# Altium integrated library Altium_Relay.IntLib: 31 symbols
Pins are listed as number, name and electrical type; pins without a type are passive.

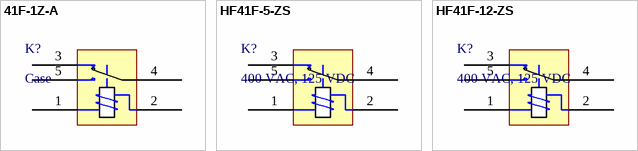
[diagram p0: symbols 41F-1Z-A to HF41F-12-ZS]

## 41F-1Z-A
designator K?, comment Case
H41F Relay Socket; Manufacturer: OEM; Manufacturer Part Number: 41F-1Z-A; Associated Relay Series: H41F; Coil Current: N/A; Coil Resistance: N/A; Coil Voltage: N/A; ComponentLink1Description: Datasheet; ComponentLink1URL: N/A; Contact Current Rating: N/A; Power Consumption: N/A; Supplier 1 URL: N/A; Supplier 2 URL: N/A; Supplier 3 URL: https://www.thegioiic.com/41f-1z-a-de-relay-hf41f-5-chan; Switching Voltage Max: N/A; Value: Case; Mount: THT; Supplier 1: Mouser; Supplier 1 Part Number: N/A; Supplier 2: Digi-Key; Supplier 2 Part Number: N/A; Supplier 3: thegioiic; Supplier 3 Part Number: N/A
footprint HF41F Relay Socket
pins: 1 Coil "-", 2 Coil "+", 3 NC, 4 Out, 5 NO

## HF41F-5-ZS
designator K?, comment 400 VAC, 125 VDC
Coil Voltage: 5 VDC; Contact Current Rating: 6A; Switching Voltage Max:  400 VAC, 125 VDC; Manufacturer: Hongfa; Manufacturer Part Number: HF41F-5-ZS; Coil Voltage: 5 VDC; Switching Voltage Max: 400 VAC, 125 VDC; Associated Relay Series: N/A; Coil Current: N/A; Coil Resistance: N/A; ComponentLink1Description: Datasheet; ComponentLink1URL: https://source.hongfa.com//pdf/web/viewer.html?file=\Uploads\Product\PDF\HF41F_en.pdf?timestamp=1691114729; Power Consumption: N/A; Supplier 1 URL: N/A; Supplier 2 URL: N/A; Supplier 3 URL: https://www.thegioiic.com/hf41f-5-zs-ro-le-5vdc-6a-spdt-5-chan; Value: 400 VAC, 125 VDC; Mount: THT; Supplier 1: Mouser; Supplier 1 Part Number: N/A; Supplier 2: Digi-Key; Supplier 2 Part Number: N/A; Supplier 3: thegioiic; Supplier 3 Part Number: N/A
footprint HF41F
pins: 1 Coil "-", 2 Coil "+", 3 NC, 4 Out, 5 NO

## HF41F-12-ZS
designator K?, comment 400 VAC, 125 VDC
Coil Voltage: 12 VDC; Contact Current Rating: 6A; Switching Voltage Max:  400 VAC, 125 VDC; Manufacturer: Hongfa; Manufacturer Part Number: HF41F-12-ZS; Coil Voltage: 12 VDC; Switching Voltage Max: 400 VAC, 125 VDC; Associated Relay Series: N/A; Coil Current: N/A; Coil Resistance: N/A; ComponentLink1Description: Datasheet; ComponentLink1URL: https://source.hongfa.com//pdf/web/viewer.html?file=\Uploads\Product\PDF\HF41F_en.pdf?timestamp=1691114729; Power Consumption: N/A; Supplier 1 URL: N/A; Supplier 2 URL: N/A; Supplier 3 URL: https://www.thegioiic.com/hf41f-12-zs-ro-le-12vdc-6a-spdt-5-chan; Value: 400 VAC, 125 VDC; Mount: THT; Supplier 1: Mouser; Supplier 1 Part Number: N/A; Supplier 2: Digi-Key; Supplier 2 Part Number: N/A; Supplier 3: thegioiic; Supplier 3 Part Number: N/A
footprint HF41F
pins: 1 Coil "-", 2 Coil "+", 3 NC, 4 Out, 5 NO


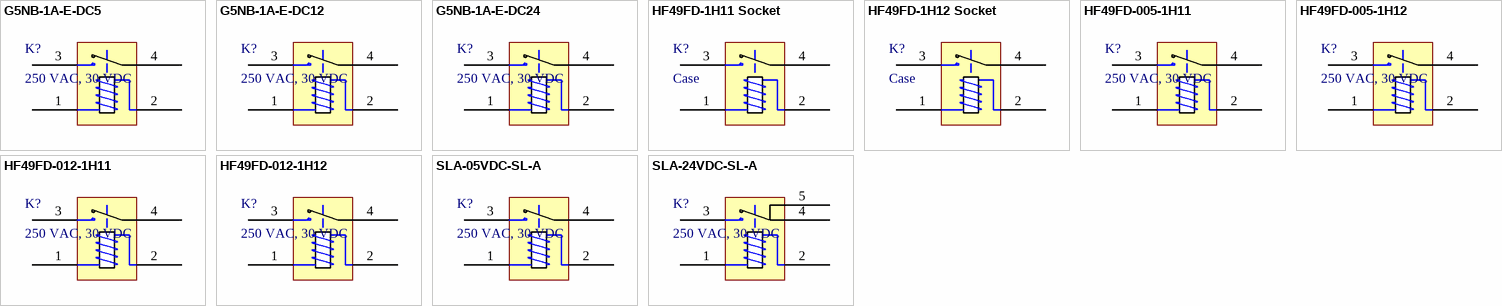
[diagram p1: symbols G5NB-1A-E-DC5 to SLA-24VDC-SL-A]

## G5NB-1A-E-DC5
designator K?, comment 250 VAC, 30 VDC
General Purpose Relays SPST-NO Flux-Tight 5VDC High-Capacity; Manufacturer: Hongfa; Manufacturer Part Number: HF46F-G 5-HS1; Contact Current Rating: 5 A; Coil Current: 40 mA; Coil Resistance: 125 Ohms; Power Consumption: 200 mW; Coil Voltage: 5 VDC; Switching Voltage Max: 250 VAC, 30 VDC; Associated Relay Series: N/A; ComponentLink1Description: Datasheet; ComponentLink1URL: https://www.mouser.vn/datasheet/2/307/en_g5nb-1112517.pdf; Supplier 1 URL: https://www.mouser.vn/ProductDetail/Omron-Electronics/G5NB-1A-E-DC24?qs=3jhwTwe4bOHjt65REhrORA%3D%3D; Supplier 2 URL: N/A; Supplier 3 URL: https://www.thegioiic.com/hf46f-g-5-hs1-ro-le-5vdc-7a-spst-no-4-chan; Value: 250 VAC, 30 VDC; Mount: THT; Package / Case: SPST; Packaging: Tape and Reel; Supplier 1: Mouser; Supplier 1 Part Number: 653-G5NB-1A-E-DC5; Supplier 2: Digi-Key; Supplier 2 Part Number: N/A; Supplier 3: thegioiic; Supplier 3 Part Number: N/A
footprint HF46F
pins: 1 Coil "-", 2 Coil "+", 3 NO, 4

## G5NB-1A-E-DC12
designator K?, comment 250 VAC, 30 VDC
General Purpose Relays SPST-NO Flux-Tight 12VDC High-Capacity; Manufacturer: Hongfa; Manufacturer Part Number: HF46F-G 12-HS1; Contact Current Rating: 5 A; Coil Current: 16.7 mA; Coil Resistance: 720 Ohms; Power Consumption: 200 mW; Coil Voltage: 12 VDC; Switching Voltage Max: 250 VAC, 30 VDC; Associated Relay Series: N/A; ComponentLink1Description: Datasheet; ComponentLink1URL: https://www.mouser.vn/datasheet/2/307/en_g5nb-1112517.pdf; Supplier 1 URL: https://www.mouser.vn/ProductDetail/Omron-Electronics/G5NB-1A-E-DC24?qs=3jhwTwe4bOHjt65REhrORA%3D%3D; Supplier 2 URL: N/A; Supplier 3 URL: https://www.thegioiic.com/hf46f-g-12-hs1-ro-le-12vdc-7a-spst-no-4-chan; Value: 250 VAC, 30 VDC; Mount: THT; Package / Case: SPST; Packaging: Tape and Reel; Supplier 1: Mouser; Supplier 1 Part Number: 653-G5NB-1A-E-DC12; Supplier 2: Digi-Key; Supplier 2 Part Number: N/A; Supplier 3: thegioiic; Supplier 3 Part Number: N/A
footprint HF46F
pins: 1 Coil "-", 2 Coil "+", 3 NO, 4

## G5NB-1A-E-DC24
designator K?, comment 250 VAC, 30 VDC
General Purpose Relays SPST-NO Flux-Tight 24VDC High-Capacity; Manufacturer: Hongfa; Manufacturer Part Number: G5NB-1A-E-24VDC; Contact Current Rating: 5 A; Coil Current: 8.3 mA; Coil Resistance: 2.88 kOhms; Power Consumption: 200 mW; Coil Voltage: 24 VDC; Switching Voltage Max: 250 VAC, 30 VDC; Associated Relay Series: N/A; ComponentLink1Description: Datasheet; ComponentLink1URL: https://www.mouser.vn/datasheet/2/307/en_g5nb-1112517.pdf; Supplier 1 URL: https://www.mouser.vn/ProductDetail/Omron-Electronics/G5NB-1A-E-DC24?qs=3jhwTwe4bOHjt65REhrORA%3D%3D; Supplier 2 URL: N/A; Supplier 3 URL: https://www.thegioiic.com/g5nb-1a-e-24vdc-ro-le-24vdc-5a-spst-no-4-chan; Value: 250 VAC, 30 VDC; Mount: THT; Package / Case: SPST; Packaging: Tape and Reel; Supplier 1: Mouser; Supplier 1 Part Number: 653-G5NB-1A-E-DC24; Supplier 2: Digi-Key; Supplier 2 Part Number: N/A; Supplier 3: thegioiic; Supplier 3 Part Number: N/A
footprint HF46F
pins: 1 Coil "-", 2 Coil "+", 3 NO, 4

## HF49FD-1H11 Socket
designator K?, comment Case
Associated Relay Series: HF49FD-1H11; Manufacturer: OEM; Coil Current: N/A; Coil Resistance: N/A; Coil Voltage: N/A; ComponentLink1Description: Datasheet; ComponentLink1URL: N/A; Contact Current Rating: N/A; Power Consumption: N/A; Supplier 1 URL: N/A; Supplier 2 URL: N/A; Supplier 3 URL: https://www.thegioiic.com/de-relay-hf49fd-1h11-4-chan; Switching Voltage Max: N/A; Value: Case; Manufacturer Part Number: HF49FD-1H11; Mount: THT; Package / Case: SPST; Packaging: Tape and Reel; Supplier 1: Mouser; Supplier 1 Part Number: N/A; Supplier 2: Digi-Key; Supplier 2 Part Number: N/A; Supplier 3: thegioiic; Supplier 3 Part Number: N/A
footprint HF49FD-1H11 Relay Scoket
pins: 1 Coil "-", 2 Coil "+", 3 NO, 4

## HF49FD-1H12 Socket
designator K?, comment Case
Associated Relay Series: HF49FD-1H12; Manufacturer: OEM; Coil Current: N/A; Coil Resistance: N/A; Coil Voltage: N/A; ComponentLink1Description: Datasheet; ComponentLink1URL: N/A; Contact Current Rating: N/A; Power Consumption: N/A; Supplier 1 URL: N/A; Supplier 2 URL: N/A; Supplier 3 URL: https://www.thegioiic.com/de-relay-hf49fd-1h12-4-chan; Switching Voltage Max: N/A; Value: Case; Manufacturer Part Number: HF49FD-1H12; Mount: THT; Package / Case: SPST; Packaging: Tape and Reel; Supplier 1: Mouser; Supplier 1 Part Number: N/A; Supplier 2: Digi-Key; Supplier 2 Part Number: N/A; Supplier 3: thegioiic; Supplier 3 Part Number: N/A
footprint HF49FD-1H12 Relay Scoket
pins: 1 Coil "-", 2 Coil "+", 3 NO, 4

## HF49FD-005-1H11
designator K?, comment 250 VAC, 30 VDC
Coil Voltage: 5 VDC; Contact Current Rating: 5A; Switching Voltage Max: 250 VAC, 30 VDC; Manufacturer: Hongfa; Manufacturer Part Number: HF49FD-005-1H11; Coil Voltage: 5 VDC; Associated Relay Series: N/A; Coil Current: N/A; Coil Resistance: N/A; ComponentLink1Description: Datasheet; ComponentLink1URL: https://source.hongfa.com//pdf/web/viewer.html?file=/Uploads/Product/PDF/HF49FD_en.pdf; Power Consumption: N/A; Supplier 1 URL: N/A; Supplier 2 URL: N/A; Supplier 3 URL: https://www.thegioiic.com/hf49fd-005-1h11-ro-le-5vdc-5a-spst-no-4-chan; Value: 250 VAC, 30 VDC; Mount: THT; Package / Case: SPST; Packaging: Tape and Reel; Supplier 1: Mouser; Supplier 1 Part Number: N/A; Supplier 2: Digi-Key; Supplier 2 Part Number: N/A; Supplier 3: thegioiic; Supplier 3 Part Number: N/A
footprint HF49FD-1H11
pins: 1 Coil "-", 2 Coil "+", 3 NO, 4

## HF49FD-005-1H12
designator K?, comment 250 VAC, 30 VDC
Coil Voltage: 5 VDC; Contact Current Rating: 5A; Switching Voltage Max: 250 VAC, 30 VDC; Manufacturer: Hongfa; Manufacturer Part Number: HF49FD-005-1H12; Coil Voltage: 5 VDC; Associated Relay Series: N/A; Coil Current: N/A; Coil Resistance: N/A; ComponentLink1Description: Datasheet; ComponentLink1URL: https://source.hongfa.com//pdf/web/viewer.html?file=/Uploads/Product/PDF/HF49FD_en.pdf; Power Consumption: N/A; Supplier 1 URL: N/A; Supplier 2 URL: N/A; Supplier 3 URL: https://www.thegioiic.com/hf49fd-005-1h12-ro-le-5vdc-5a-spst-no-4-chan; Value: 250 VAC, 30 VDC; Mount: THT; Package / Case: SPST; Packaging: Tape and Reel; Supplier 1: Mouser; Supplier 1 Part Number: N/A; Supplier 2: Digi-Key; Supplier 2 Part Number: N/A; Supplier 3: thegioiic; Supplier 3 Part Number: N/A
footprint HF49FD-1H12
pins: 1 Coil "-", 2 Coil "+", 3 NO, 4

## HF49FD-012-1H11
designator K?, comment 250 VAC, 30 VDC
Coil Voltage: 12 VDC; Contact Current Rating: 5A; Switching Voltage Max: 250 VAC, 30 VDC; Manufacturer: Hongfa; Manufacturer Part Number: HF49FD-012-1H11; Coil Voltage: 12 VDC; Associated Relay Series: N/A; Coil Current: N/A; Coil Resistance: N/A; ComponentLink1Description: Datasheet; ComponentLink1URL: https://source.hongfa.com//pdf/web/viewer.html?file=/Uploads/Product/PDF/HF49FD_en.pdf; Power Consumption: N/A; Supplier 1 URL: N/A; Supplier 2 URL: N/A; Supplier 3 URL: https://www.thegioiic.com/hf49fd-012-1h11-ro-le-12vdc-5a-spst-no-4-chan; Value: 250 VAC, 30 VDC; Mount: THT; Package / Case: SPST; Packaging: Tape and Reel; Supplier 1: Mouser; Supplier 1 Part Number: N/A; Supplier 2: Digi-Key; Supplier 2 Part Number: N/A; Supplier 3: thegioiic; Supplier 3 Part Number: N/A
footprint HF49FD-1H11
pins: 1 Coil "-", 2 Coil "+", 3 NO, 4

## HF49FD-012-1H12
designator K?, comment 250 VAC, 30 VDC
Coil Voltage: 12 VDC; Contact Current Rating: 5A; Switching Voltage Max: 250 VAC, 30 VDC; Manufacturer: Hongfa; Manufacturer Part Number: HF49FD-012-1H12; Coil Voltage: 12 VDC; Associated Relay Series: N/A; Coil Current: N/A; Coil Resistance: N/A; ComponentLink1Description: Datasheet; ComponentLink1URL: https://source.hongfa.com//pdf/web/viewer.html?file=/Uploads/Product/PDF/HF49FD_en.pdf; Power Consumption: N/A; Supplier 1 URL: N/A; Supplier 2 URL: N/A; Supplier 3 URL: https://www.thegioiic.com/hf49fd-012-1h12-ro-le-12vdc-5a-spst-no-4-chan; Value: 250 VAC, 30 VDC; Mount: THT; Package / Case: SPST; Packaging: Tape and Reel; Supplier 1: Mouser; Supplier 1 Part Number: N/A; Supplier 2: Digi-Key; Supplier 2 Part Number: N/A; Supplier 3: thegioiic; Supplier 3 Part Number: N/A
footprint HF49FD-1H12
pins: 1 Coil "-", 2 Coil "+", 3 NO, 4

## SLA-05VDC-SL-A
designator K?, comment 250 VAC, 30 VDC
SUBMINATURE HIGH POWER RELAY 4P 30A; Manufacturer: Ningbo Songle Relay; Manufacturer Part Number: SLA-05VDC-SL-A; Coil Voltage: 5 VDC; Coil Current: 40 mA; Coil Resistance: 27 Ohms; Power Consumption: 900 mW; Contact Current Rating: 30 A; Switching Voltage Max: 250 VAC, 30 VDC; Associated Relay Series: N/A; ComponentLink1Description: Datasheet; ComponentLink1URL: https://www.mouser.vn/datasheet/2/307/en_g5nb-1112517.pdf; Supplier 1 URL: N/A; Supplier 2 URL: N/A; Supplier 3 URL: https://www.thegioiic.com/sla-05vdc-sl-a-ro-le-5vdc-30a-spst-4-chan; Value: 250 VAC, 30 VDC; Mount: THT; Package / Case: SPST; Packaging: Tape and Reel; Supplier 1: Mouser; Supplier 1 Part Number: N/A; Supplier 2: Digi-Key; Supplier 2 Part Number: N/A; Supplier 3: thegioiic; Supplier 3 Part Number: SLA-05VDC-SL-A
footprint SLA-05VDC-SL-A
pins: 1 Coil "-", 2 Coil "+", 3 NO, 4

## SLA-24VDC-SL-A
designator K?, comment 250 VAC, 30 VDC
SUBMINATURE HIGH POWER RELAY 5P 30A; Manufacturer: Ningbo Songle Relay; Manufacturer Part Number: SLA-24VDC-SL-A; Coil Voltage: 24 VDC; Coil Current: 37.5 mA; Coil Resistance: 640 Ohms; Power Consumption: 900 mW; Contact Current Rating: 30 A; Switching Voltage Max: 250 VAC, 30 VDC; Associated Relay Series: N/A; ComponentLink1Description: Datasheet; ComponentLink1URL: https://www.mouser.vn/datasheet/2/307/en_g5nb-1112517.pdf; Supplier 1 URL: N/A; Supplier 2 URL: N/A; Supplier 3 URL: https://linhkienchatluong.vn/relay-24v/sla-24vdc-sl-a-t90-relay-24v-30a-5-chan_sp635_ct3937.aspx; Value: 250 VAC, 30 VDC; Mount: THT; Package / Case: SPST; Packaging: Tape and Reel; Supplier 1: Mouser; Supplier 1 Part Number: N/A; Supplier 2: Digi-Key; Supplier 2 Part Number: N/A; Supplier 3: linhkienchatluong; Supplier 3 Part Number: SLA-24VDC-SL-A
footprint SLA-05VDC-SL-A
pins: 1 Coil "-", 2 Coil "+", 3 NO, 4, 5


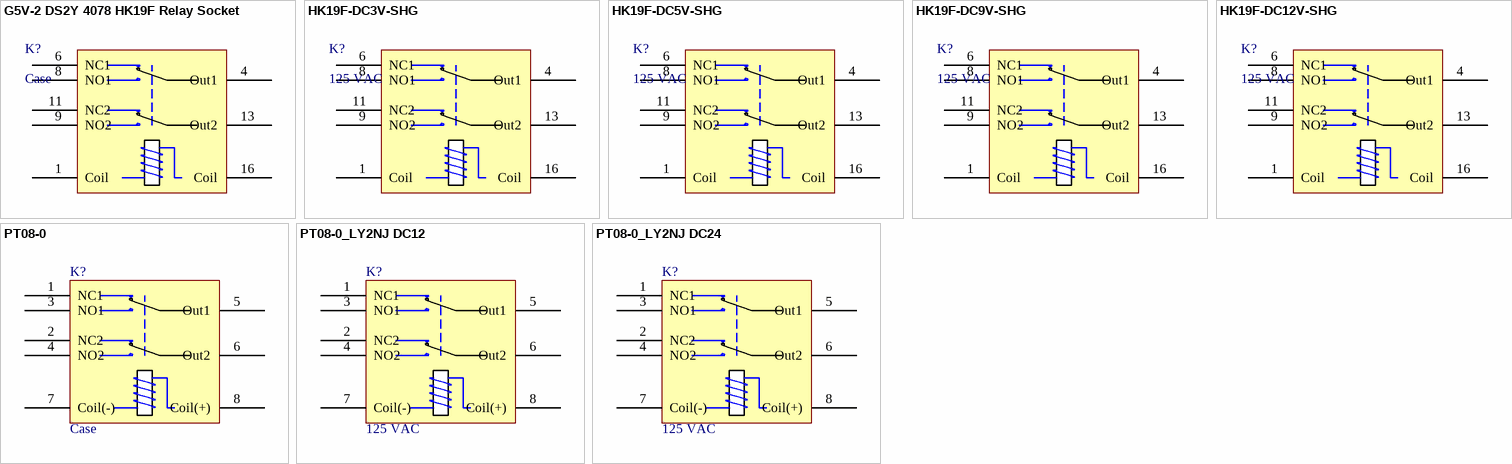
[diagram p2: symbols G5V-2 DS2Y 4078 HK19F Relay Socket to PT08-0_LY2NJ DC24]

## G5V-2 DS2Y 4078 HK19F Relay Socket
designator K?, comment Case
Associated Relay Series: G5V-2, DS2Y, 4078 HK19F; Manufacturer: OEM; Coil Current: N/A; Coil Resistance: N/A; Coil Voltage: N/A; ComponentLink1Description: Datasheet; ComponentLink1URL: N/A; Contact Current Rating: N/A; Power Consumption: N/A; Supplier 1 URL: N/A; Supplier 2 URL: N/A; Supplier 3 URL: https://www.thegioiic.com/de-relay-g5v-2-ds2y-4078-hk19f-8-chan; Switching Voltage: N/A; Value: Case; Manufacturer Part Number: N/A; Mount: THT; Operating Temperature Max: + 85 C; Operating Temperature Min: - 40 C; Package / Case: N/A; Packaging: N/A; Supplier 1: Mouser; Supplier 1 Part Number: N/A; Supplier 2: Digi-Key; Supplier 2 Part Number: N/A; Supplier 3: thegioiic; Supplier 3 Part Number: N/A
footprint G5V-2 DS2Y 4078 HK19F Relay Socket
pins: 1 Coil "-", 4 Out1, 6 NC1, 8 NO1, 9 NO2, 11 NC2, 13 Out2, 16 Coil "+"

## HK19F-DC3V-SHG
designator K?, comment 125 VAC
Coil Voltage: 3 VDC; Contact Current Rating: 1A; Switching Voltage Max: 125 VAC; Manufacturer: HUIKE; Manufacturer Part Number: HK19F-DC3V-SHG; Coil Voltage: 3 VDC; Coil Current: N/A; Coil Resistance: N/A; ComponentLink1Description: Datasheet; ComponentLink1URL: https://components101.com/sites/default/files/component_datasheet/HK19F-12V%20DPDT%20Relay%20Datasheet.pdf; Power Consumption: N/A; Supplier 1 URL: N/A; Supplier 2 URL: N/A; Supplier 3 URL: https://www.thegioiic.com/hk19f-dc3v-shg-ro-le-3vdc-1a-spdt-8-chan; Switching Voltage: 125 VAC; Value: 125 VAC; Mount: THT; Operating Temperature Max: + 85 C; Operating Temperature Min: - 40 C; Package / Case: N/A; Packaging: N/A; Supplier 1: Mouser; Supplier 1 Part Number: N/A; Supplier 2: Digi-Key; Supplier 2 Part Number: N/A; Supplier 3: thegioiic; Supplier 3 Part Number: HK19F-DC3V-SHG
footprint HK19F
pins: 1 Coil "-", 4 Out1, 6 NC1, 8 NO1, 9 NO2, 11 NC2, 13 Out2, 16 Coil "+"

## HK19F-DC5V-SHG
designator K?, comment 125 VAC
Coil Voltage: 5 VDC; Contact Current Rating:  1A; Switching Voltage Max: 125 VAC; Manufacturer: HUIKE; Manufacturer Part Number: HK19F-DC5V-SHG; Coil Voltage: 5 VDC; Contact Current Rating: 1A; Coil Current: N/A; Coil Resistance: N/A; ComponentLink1Description: Datasheet; ComponentLink1URL: https://components101.com/sites/default/files/component_datasheet/HK19F-12V%20DPDT%20Relay%20Datasheet.pdf; Power Consumption: N/A; Supplier 1 URL: N/A; Supplier 2 URL: N/A; Supplier 3 URL: https://www.thegioiic.com/hk19f-dc5v-shg-ro-le-5vdc-1a-spdt-8-chan; Switching Voltage: 125 VAC; Value: 125 VAC; Mount: THT; Operating Temperature Max: + 85 C; Operating Temperature Min: - 40 C; Package / Case: N/A; Packaging: N/A; Supplier 1: Mouser; Supplier 1 Part Number: N/A; Supplier 2: Digi-Key; Supplier 2 Part Number: N/A; Supplier 3: thegioiic; Supplier 3 Part Number: HK19F-DC5V-SHG
footprint HK19F
pins: 1 Coil "-", 4 Out1, 6 NC1, 8 NO1, 9 NO2, 11 NC2, 13 Out2, 16 Coil "+"

## HK19F-DC9V-SHG
designator K?, comment 125 VAC
Coil Voltage: 9 VDC; Contact Current Rating:  1A; Switching Voltage Max: 125 VAC; Manufacturer: HUIKE; Manufacturer Part Number: HK19F-DC9V-SHG; Coil Voltage: 9 VDC; Contact Current Rating: 1A; Coil Current: N/A; Coil Resistance: N/A; ComponentLink1Description: Datasheet; ComponentLink1URL: https://components101.com/sites/default/files/component_datasheet/HK19F-12V%20DPDT%20Relay%20Datasheet.pdf; Power Consumption: N/A; Supplier 1 URL: N/A; Supplier 2 URL: N/A; Supplier 3 URL: https://www.thegioiic.com/hk19f-dc9v-shg-ro-le-9vdc-1a-spdt-8-chan; Switching Voltage: 125 VAC; Value: 125 VAC; Mount: THT; Operating Temperature Max: + 85 C; Operating Temperature Min: - 40 C; Package / Case: N/A; Packaging: N/A; Supplier 1: Mouser; Supplier 1 Part Number: N/A; Supplier 2: Digi-Key; Supplier 2 Part Number: N/A; Supplier 3: thegioiic; Supplier 3 Part Number: HK19F-DC9V-SHG
footprint HK19F
pins: 1 Coil "-", 4 Out1, 6 NC1, 8 NO1, 9 NO2, 11 NC2, 13 Out2, 16 Coil "+"

## HK19F-DC12V-SHG
designator K?, comment 125 VAC
Coil Voltage: 12 VDC; Contact Current Rating:  1A; Switching Voltage Max: 125 VAC; Manufacturer: HUIKE; Manufacturer Part Number: HK19F-DC12V-SHG; Coil Voltage: 12 VDC; Contact Current Rating: 1A; Coil Current: N/A; Coil Resistance: N/A; ComponentLink1Description: Datasheet; ComponentLink1URL: https://components101.com/sites/default/files/component_datasheet/HK19F-12V%20DPDT%20Relay%20Datasheet.pdf; Power Consumption: N/A; Supplier 1 URL: N/A; Supplier 2 URL: N/A; Supplier 3 URL: https://www.thegioiic.com/hk19f-dc12v-shg-ro-le-12vdc-1a-spdt-8-chan; Switching Voltage: 125 VAC; Value: 125 VAC; Mount: THT; Operating Temperature Max: + 85 C; Operating Temperature Min: - 40 C; Package / Case: N/A; Packaging: N/A; Supplier 1: Mouser; Supplier 1 Part Number: N/A; Supplier 2: Digi-Key; Supplier 2 Part Number: N/A; Supplier 3: thegioiic; Supplier 3 Part Number: HK19F-DC12V-SHG
footprint HK19F
pins: 1 Coil "-", 4 Out1, 6 NC1, 8 NO1, 9 NO2, 11 NC2, 13 Out2, 16 Coil "+"

## PT08-0
designator K?, comment Case
Suitable for LY2N; Manufacturer: OEM; Manufacturer Part Number: 13F-2Z-A2; Coil Current: N/A; Coil Resistance: N/A; Coil Voltage: N/A; ComponentLink1Description: Datasheet; ComponentLink1URL: https://assets.omron.com/m/3e54678f7feeb2fc/original/LY-Electromechanical-Relay-Datasheet.pdf; Contact Current Rating: N/A; Power Consumption: N/A; Supplier 1 URL: https://www.mouser.com/ProductDetail/Omron-Automation-and-Safety/PT08-0?qs=0w99tykdtPI4S7EgdqDgpA%3D%3D; Supplier 2 URL: https://www.digikey.com/en/products/detail/omron-automation-and-safety/PT08-0/126876; Supplier 3 URL: https://www.thegioiic.com/13f-2z-a2-de-relay-ly2n-j-8-chan-han-pcb; Switching Voltage: N/A; Value: Case; Mount: THT; Operating Temperature Max: + 85 C; Operating Temperature Min: - 40 C; Package / Case: N/A; Packaging: N/A; Supplier 1: Mouser; Supplier 1 Part Number: 653-PT08-0; Supplier 2: Digi-Key; Supplier 2 Part Number: Z792-ND; Supplier 3: thegioiic; Supplier 3 Part Number: 13F-2Z-A2
footprint PT08-0
pins: 1 NC1, 2 NC2, 3 NO1, 4 NO2, 5 Out1, 6 Out2, 7 Coil(-) "-", 8 Coil(+) "+"

## PT08-0_LY2NJ DC12
designator K?, comment 125 VAC
Coil Voltage: 12 VDC; Power Consumption: 900 mW; Manufacturer: OEM; Manufacturer Part Number: HH62P LY2NJ; Coil Current: 75 mA; Coil Resistance: 160 Ohms; Coil Voltage: 12 VDC; Power Consumption: 900 mW; Switching Voltage: 250 VAC, 125 VDC; ComponentLink1Description: Datasheet; ComponentLink1URL: https://assets.omron.com/m/3e54678f7feeb2fc/original/LY-Electromechanical-Relay-Datasheet.pdf; Contact Current Rating: N/A; Supplier 1 URL: https://www.mouser.com/ProductDetail/Omron-Automation-and-Safety/LY2N-DC12?qs=DHrpRJakPMOsYy5oky1q7w%3D%3D; Supplier 2 URL: https://www.digikey.com/en/products/detail/omron-automation-and-safety/LY2N-DC12/369492; Supplier 3 URL: https://www.thegioiic.com/hh62p-ly2nj-ro-le-12vdc-10a-dpdt-8-chan; Value: 125 VAC; Mount: THT; Operating Temperature Max: + 85 C; Operating Temperature Min: - 40 C; Package / Case: N/A; Packaging: N/A; Supplier 1: Mouser; Supplier 1 Part Number: 653-LY2NDC12; Supplier 2: Digi-Key; Supplier 2 Part Number: Z2603-ND; Supplier 3: thegioiic; Supplier 3 Part Number: HH62P LY2NJ
footprint PT08-0_LY2NJ
footprint PT08-0_LY2NJ - Dew u no de wey
pins: 1 NC1, 2 NC2, 3 NO1, 4 NO2, 5 Out1, 6 Out2, 7 Coil(-) "-", 8 Coil(+) "+"

## PT08-0_LY2NJ DC24
designator K?, comment 125 VAC
Coil Voltage: 24 VDC; Power Consumption: 900 mW; Manufacturer: OEM; Manufacturer Part Number: LY2NJ DC24; Coil Current: 36.9 mA; Coil Resistance: 650 Ohms; Coil Voltage: 24 VDC; Power Consumption: 900 mW; Switching Voltage: 250 VAC, 125 VDC; ComponentLink1Description: Datasheet; ComponentLink1URL: https://assets.omron.com/m/3e54678f7feeb2fc/original/LY-Electromechanical-Relay-Datasheet.pdf; Contact Current Rating: N/A; Supplier 1 URL: https://www.mouser.com/ProductDetail/Omron-Automation-and-Safety/LY2N-D2-DC24?qs=kyocjfxn8IrbKDYptT7zlA%3D%3D; Supplier 2 URL: https://www.digikey.com/en/products/detail/omron-automation-and-safety/LY2N-DC24/369493; Supplier 3 URL: https://www.thegioiic.com/ly2nj-dc24-ro-le-24vdc-10a-dpdt-8-chan; Value: 125 VAC; Mount: THT; Operating Temperature Max: + 85 C; Operating Temperature Min: - 40 C; Package / Case: N/A; Packaging: N/A; Supplier 1: Mouser; Supplier 1 Part Number: 653-LY2N-D2-DC24; Supplier 2: Digi-Key; Supplier 2 Part Number: Z2604-ND; Supplier 3: thegioiic; Supplier 3 Part Number: LY2NJ DC24
footprint PT08-0_LY2NJ
footprint PT08-0_LY2NJ - HeheBoyI'mPepe
pins: 1 NC1, 2 NC2, 3 NO1, 4 NO2, 5 Out1, 6 Out2, 7 Coil(-) "-", 8 Coil(+) "+"


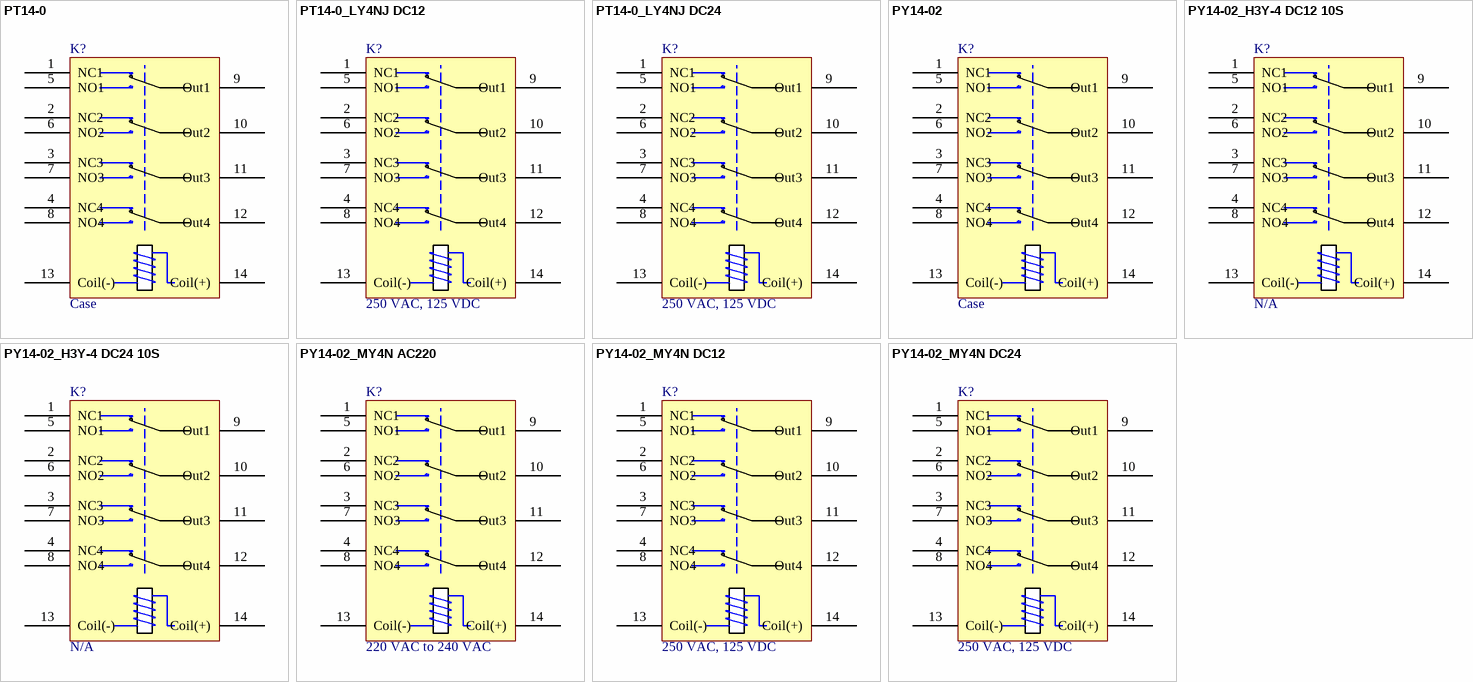
[diagram p3: symbols PT14-0 to PY14-02_MY4N DC24]

## PT14-0
designator K?, comment Case
Suitable for LY4N; Manufacturer: OEM; Model: PT14-0; Associated Relay Series: LY4N; Coil Current: N/A; Coil Resistance: N/A; Coil Voltage: N/A; ComponentLink1Description: Datasheet; ComponentLink1URL: https://assets.omron.com/m/3e54678f7feeb2fc/original/LY-Electromechanical-Relay-Datasheet.pdf; Contact Current Rating: N/A; Power Consumption: N/A; Supplier 1 URL: https://www.mouser.com/ProductDetail/Omron-Automation-and-Safety/PT14-0?qs=lK7M36XCk6KbgQGH0MzVRQ%3D%3D; Supplier 2 URL: https://www.digikey.com/en/products/detail/omron-automation-and-safety/PT14-0/369804; Supplier 3 URL: https://www.thegioiic.com/13f-4z-a2-de-relay-ly4n-j-14-chan-han-pcb; Switching Voltage: N/A; Value: Case; Manufacturer Part Number: N/A; Mount: THT; Operating Temperature Max: + 85 C; Operating Temperature Min: - 40 C; Package / Case: PDT; Supplier 1: Mouser; Supplier 1 Part Number: 653-PT14-0; Supplier 2: Digi-Key; Supplier 2 Part Number: Z5912-ND; Supplier 3: thegioiic; Supplier 3 Part Number: 13F-4Z-A2
footprint PT14-0
pins: 1 NC1, 2 NC2, 3 NC3, 4 NC4, 5 NO1, 6 NO2, 7 NO3, 8 NO4, 9 Out1, 10 Out2, 11 Out3, 12 Out4, 13 Coil(-) "-", 14 Coil(+) "+"

## PT14-0_LY4NJ DC12
designator K?, comment 250 VAC, 125 VDC
Coil Voltage: 12 VDC; Power Consumption: 900 mW; Manufacturer: OEM; Model: PT14-0 with LY4NJ DC12; Coil Current: 120 mA; Coil Resistance: 100 Ohms; Coil Voltage: 12 VDC; Power Consumption: 1.5 W; Switching Voltage: 250 VAC, 125 VDC; Associated Relay Series: N/A; ComponentLink1Description: Datasheet; ComponentLink1URL: https://assets.omron.com/m/3e54678f7feeb2fc/original/LY-Electromechanical-Relay-Datasheet.pdf; Contact Current Rating: N/A; Supplier 1 URL: https://www.mouser.com/ProductDetail/Omron-Automation-and-Safety/LY4N-D2-DC12?qs=PuRzBkp%252Brz6S%2FUV9Ejs9dw%3D%3D; Supplier 2 URL: https://www.digikey.com/en/products/detail/omron-automation-and-safety/LY4N-DC12/369576; Supplier 3 URL: N/A; Value: 250 VAC, 125 VDC; Manufacturer Part Number: N/A; Mount: THT; Operating Temperature Max: + 85 C; Operating Temperature Min: - 40 C; Package / Case: PDT; Supplier 1: Mouser; Supplier 1 Part Number: 653-LY4N-D2DC12; Supplier 2: Digi-Key; Supplier 2 Part Number: Z6262-ND; Supplier 3: thegioiic; Supplier 3 Part Number: N/A
footprint PT14-0_LY4NJ
footprint PT14-0_LY4NJ - *cluck* *cluck* *cluck* *cluck*
pins: 1 NC1, 2 NC2, 3 NC3, 4 NC4, 5 NO1, 6 NO2, 7 NO3, 8 NO4, 9 Out1, 10 Out2, 11 Out3, 12 Out4, 13 Coil(-) "-", 14 Coil(+) "+"

## PT14-0_LY4NJ DC24
designator K?, comment 250 VAC, 125 VDC
Coil Voltage: 24 VDC; Power Consumption: 900 mW; Manufacturer: OEM; Model: PT14-0 with LY4NJ DC24; Coil Current: 69 mA; Coil Resistance: 350 Ohms; Coil Voltage: 24 VDC; Power Consumption: 1.5 W; Switching Voltage: 250 VAC, 125 VDC; Associated Relay Series: N/A; ComponentLink1Description: Datasheet; ComponentLink1URL: https://assets.omron.com/m/3e54678f7feeb2fc/original/LY-Electromechanical-Relay-Datasheet.pdf; Contact Current Rating: N/A; Supplier 1 URL: https://www.mouser.com/ProductDetail/Omron-Automation-and-Safety/LY4N-DC24?qs=pWf36BUtxBjTuKIbmN9IQQ%3D%3D; Supplier 2 URL: https://www.digikey.com/en/products/detail/omron-automation-and-safety/LY4N-DC24/369577; Supplier 3 URL: https://www.thegioiic.com/ly4nj-dc24-ro-le-24vdc-10a-4pdt-14-chan; Value: 250 VAC, 125 VDC; Manufacturer Part Number: N/A; Mount: THT; Operating Temperature Max: + 85 C; Operating Temperature Min: - 40 C; Package / Case: PDT; Supplier 1: Mouser; Supplier 1 Part Number: 653-LY4N-DC24; Supplier 2: Digi-Key; Supplier 2 Part Number: Z2275-ND; Supplier 3: thegioiic; Supplier 3 Part Number: LY4NJ-DC24
footprint PT14-0_LY4NJ
footprint PT14-0_LY4NJ - Pepe sounds like pif
pins: 1 NC1, 2 NC2, 3 NC3, 4 NC4, 5 NO1, 6 NO2, 7 NO3, 8 NO4, 9 Out1, 10 Out2, 11 Out3, 12 Out4, 13 Coil(-) "-", 14 Coil(+) "+"

## PY14-02
designator K?, comment Case
Suitable for HH54P, MY4N, H3Y-4; Manufacturer: OEM; Model: PY14-02; Associated Relay Series: HH54P, MY4N, H3Y-4; Coil Current: N/A; Coil Resistance: N/A; Coil Voltage: N/A; ComponentLink1Description: Datasheet; ComponentLink1URL: https://assets.omron.eu/downloads/datasheet/en/v10/my-gs_datasheet_en.pdf; Contact Current Rating: N/A; Power Consumption: N/A; Supplier 1 URL: https://www.mouser.com/ProductDetail/Omron-Automation-and-Safety/PY14-02?qs=sQVrL4YZhsT%252BfQC7zib9Cw%3D%3D; Supplier 2 URL: https://www.digikey.com/en/products/detail/omron-automation-and-safety/PY14-02/127289; Supplier 3 URL: https://www.thegioiic.com/py14-02-de-relay-hh54p-my4n-h3y-4-14-chan; Switching Voltage: N/A; Value: Case; Manufacturer Part Number: N/A; Mount: THT; Operating Temperature Max: + 85 C; Operating Temperature Min: - 40 C; Package / Case: PDT; Supplier 1: Mouser; Supplier 1 Part Number: 653-PY14-02; Supplier 2: Digi-Key; Supplier 2 Part Number: Z813-ND; Supplier 3: thegioiic; Supplier 3 Part Number: PY14-02
footprint PY14-02
pins: 1 NC1, 2 NC2, 3 NC3, 4 NC4, 5 NO1, 6 NO2, 7 NO3, 8 NO4, 9 Out1, 10 Out2, 11 Out3, 12 Out4, 13 Coil(-) "-", 14 Coil(+) "+"

## PY14-02_H3Y-4 DC12 10S
designator K?, comment N/A
Coil Voltage: 12 VDC; Time: 10s; Manufacturer: OEM; Model: PY14-02 with H3Y-4 DC12 10s; Coil Voltage: 12 VDC; Coil Current: N/A; Coil Resistance: N/A; Power Consumption: N/A; Switching Voltage: N/A; Associated Relay Series: N/A; ComponentLink1Description: Datasheet; ComponentLink1URL: https://assets.omron.eu/downloads/datasheet/en/v3/m092_h3y-series_solid-state_timers_datasheet_en.pdf; Contact Current Rating: N/A; Supplier 1 URL: N/A; Supplier 2 URL: N/A; Supplier 3 URL: https://www.thegioiic.com/h3y-4-ro-le-hen-gio-on-delay-10-giay-12vdc-4pdt; Value: N/A; Manufacturer Part Number: N/A; Mount: THT; Operating Temperature Max: + 85 C; Operating Temperature Min: - 40 C; Package / Case: PDT; Supplier 1: Mouser; Supplier 1 Part Number: N/A; Supplier 2: Digi-Key; Supplier 2 Part Number: N/A; Supplier 3: thegioiic; Supplier 3 Part Number: H3Y-4
footprint PY14-02_H3Y-4
pins: 1 NC1, 2 NC2, 3 NC3, 4 NC4, 5 NO1, 6 NO2, 7 NO3, 8 NO4, 9 Out1, 10 Out2, 11 Out3, 12 Out4, 13 Coil(-) "-", 14 Coil(+) "+"

## PY14-02_H3Y-4 DC24 10S
designator K?, comment N/A
Coil Voltage: 24 VDC; Time: 10s; Manufacturer: OEM; Model: PY14-02 with H3Y-4 DC24 10s; Coil Voltage: 24 VDC; Coil Current: N/A; Coil Resistance: N/A; Power Consumption: N/A; Switching Voltage: N/A; Associated Relay Series: N/A; ComponentLink1Description: Datasheet; ComponentLink1URL: https://assets.omron.eu/downloads/datasheet/en/v3/m092_h3y-series_solid-state_timers_datasheet_en.pdf; Contact Current Rating: N/A; Supplier 1 URL: https://www.mouser.com/ProductDetail/Omron-Automation-and-Safety/H3Y-4DC2410S?qs=3HJ2avRr9PLs586KVxQtQw%3D%3D; Supplier 2 URL: https://www.digikey.com/en/products/detail/omron-automation-and-safety/H3Y-4-DC24-5S/2669459; Supplier 3 URL: https://www.thegioiic.com/h3y-4-ro-le-hen-gio-on-delay-10-giay-24vdc-4pdt; Value: N/A; Manufacturer Part Number: N/A; Mount: THT; Operating Temperature Max: + 85 C; Operating Temperature Min: - 40 C; Package / Case: PDT; Supplier 1: Mouser; Supplier 1 Part Number: 653-H3Y-4DC2410S; Supplier 2: Digi-Key; Supplier 2 Part Number: Z12650-ND; Supplier 3: thegioiic; Supplier 3 Part Number: H3Y-4
footprint PY14-02_H3Y-4
pins: 1 NC1, 2 NC2, 3 NC3, 4 NC4, 5 NO1, 6 NO2, 7 NO3, 8 NO4, 9 Out1, 10 Out2, 11 Out3, 12 Out4, 13 Coil(-) "-", 14 Coil(+) "+"

## PY14-02_MY4N AC220
designator K?, comment 220 VAC to 240 VAC
Coil Voltage: 220 VAC; Power Consumption: 900 mW; Manufacturer: Omron; Manufacturer Part Number: MY4N-GS-220VAC; Model: PY14-02 with MY4N AC220; Coil Current: 5.3 mA; Coil Resistance: 18.79 kOhms; Coil Voltage: 220 VAC; Power Consumption: 1.1 W; Switching Voltage: 220 VAC to 240 VAC; Associated Relay Series: N/A; ComponentLink1Description: Datasheet; ComponentLink1URL: https://assets.omron.eu/downloads/datasheet/en/v10/my-gs_datasheet_en.pdf; Contact Current Rating: N/A; Supplier 1 URL: https://www.mouser.com/ProductDetail/Omron-Automation-and-Safety/MY4N-CR-AC220-240-S?qs=NHN4o8quFyTSJSWn5FSQzA%3D%3D; Supplier 2 URL: https://www.digikey.com/en/products/detail/omron-automation-and-safety/MY4N-AC200-220-S/1814345; Supplier 3 URL: https://www.thegioiic.com/my4n-gs-220vac-ro-le-220vdc-3a-4pdt-14-chan; Value: 220 VAC to 240 VAC; Mount: THT; Operating Temperature Max: + 85 C; Operating Temperature Min: - 40 C; Package / Case: PDT; Supplier 1: Mouser; Supplier 1 Part Number: 653-MY4N-CRAC220240S; Supplier 2: Digi-Key; Supplier 2 Part Number: Z12605-ND; Supplier 3: thegioiic; Supplier 3 Part Number: MY4N-GS-220VAC
footprint PY14-02_MY4IN
pins: 1 NC1, 2 NC2, 3 NC3, 4 NC4, 5 NO1, 6 NO2, 7 NO3, 8 NO4, 9 Out1, 10 Out2, 11 Out3, 12 Out4, 13 Coil(-) "-", 14 Coil(+) "+"

## PY14-02_MY4N DC12
designator K?, comment 250 VAC, 125 VDC
Coil Voltage: 12 VDC; Power Consumption: 900 mW; Manufacturer: OEM; Manufacturer Part Number: MY4N-GS-DC12; Model: PY14-02 with MY4N DC12; Coil Current: 75 mA; Coil Resistance: 160 Ohms; Coil Voltage: 12 VDC; Power Consumption: 900 mW; Switching Voltage: 250 VAC, 125 VDC; Associated Relay Series: N/A; ComponentLink1Description: Datasheet; ComponentLink1URL: https://assets.omron.eu/downloads/datasheet/en/v10/my-gs_datasheet_en.pdf; Contact Current Rating: N/A; Supplier 1 URL: https://www.mouser.com/ProductDetail/Omron-Automation-and-Safety/MY4N-DC12S?qs=UirnxRGj1IfdDzWMebvtsg%3D%3D; Supplier 2 URL: https://www.digikey.com/en/products/detail/omron-automation-and-safety/MY4N-DC12-S/369742; Supplier 3 URL: https://www.thegioiic.com/my4n-gs-dc12-ro-le-12vdc-3a-4pdt-14-chan; Value: 250 VAC, 125 VDC; Mount: THT; Operating Temperature Max: + 85 C; Operating Temperature Min: - 40 C; Package / Case: PDT; Supplier 1: Mouser; Supplier 1 Part Number: 653-MY4N-DC12(S); Supplier 2: Digi-Key; Supplier 2 Part Number: Z2279-ND; Supplier 3: thegioiic; Supplier 3 Part Number: MY4N-GS-DC12
footprint PY14-02_MY4IN
pins: 1 NC1, 2 NC2, 3 NC3, 4 NC4, 5 NO1, 6 NO2, 7 NO3, 8 NO4, 9 Out1, 10 Out2, 11 Out3, 12 Out4, 13 Coil(-) "-", 14 Coil(+) "+"

## PY14-02_MY4N DC24
designator K?, comment 250 VAC, 125 VDC
Coil Voltage: 24 VDC; Power Consumption: 900 mW; Manufacturer: Omron; Manufacturer Part Number: MY4N-GS-DC24; Model: PY14-02 with MY4N DC24; Coil Current: 53.8 mA; Coil Resistance: 46 Ohms; Coil Voltage: 24 VDC; Power Consumption: 900 mW; Switching Voltage: 250 VAC, 125 VDC; Associated Relay Series: N/A; ComponentLink1Description: Datasheet; ComponentLink1URL: https://assets.omron.eu/downloads/datasheet/en/v10/my-gs_datasheet_en.pdf; Contact Current Rating: N/A; Supplier 1 URL: https://www.mouser.com/ProductDetail/Omron-Automation-and-Safety/MY4N-D2-DC24S?qs=ImaqFqjHA4kO1fGd1XanDw%3D%3D; Supplier 2 URL: https://www.digikey.com/en/products/detail/omron-automation-and-safety/MY4N-D2-DC24-S/369740; Supplier 3 URL: https://www.thegioiic.com/my4n-gs-dc24-ro-le-24vdc-3a-4pdt-14-chan; Value: 250 VAC, 125 VDC; Mount: THT; Operating Temperature Max: + 85 C; Operating Temperature Min: - 40 C; Package / Case: PDT; Supplier 1: Mouser; Supplier 1 Part Number: 653-MY4N-D2-DC24S; Supplier 2: Digi-Key; Supplier 2 Part Number: Z2278-ND; Supplier 3: thegioiic; Supplier 3 Part Number: MY4N-GS-DC24
footprint PY14-02_MY4IN
pins: 1 NC1, 2 NC2, 3 NC3, 4 NC4, 5 NO1, 6 NO2, 7 NO3, 8 NO4, 9 Out1, 10 Out2, 11 Out3, 12 Out4, 13 Coil(-) "-", 14 Coil(+) "+"